# Altium footprint library KrakenFootprints.PcbLib: 8 footprints
Each footprint in its own frame and in the unit in brackets; x right, y up, seen from the top. Pads: shape width x height; smd on the part's side, far side on the other; paste and mask are expansions set on the pad; w line width, h text height; cw(c..) or ccw(c..) is an arc to the next point about the centre after c.
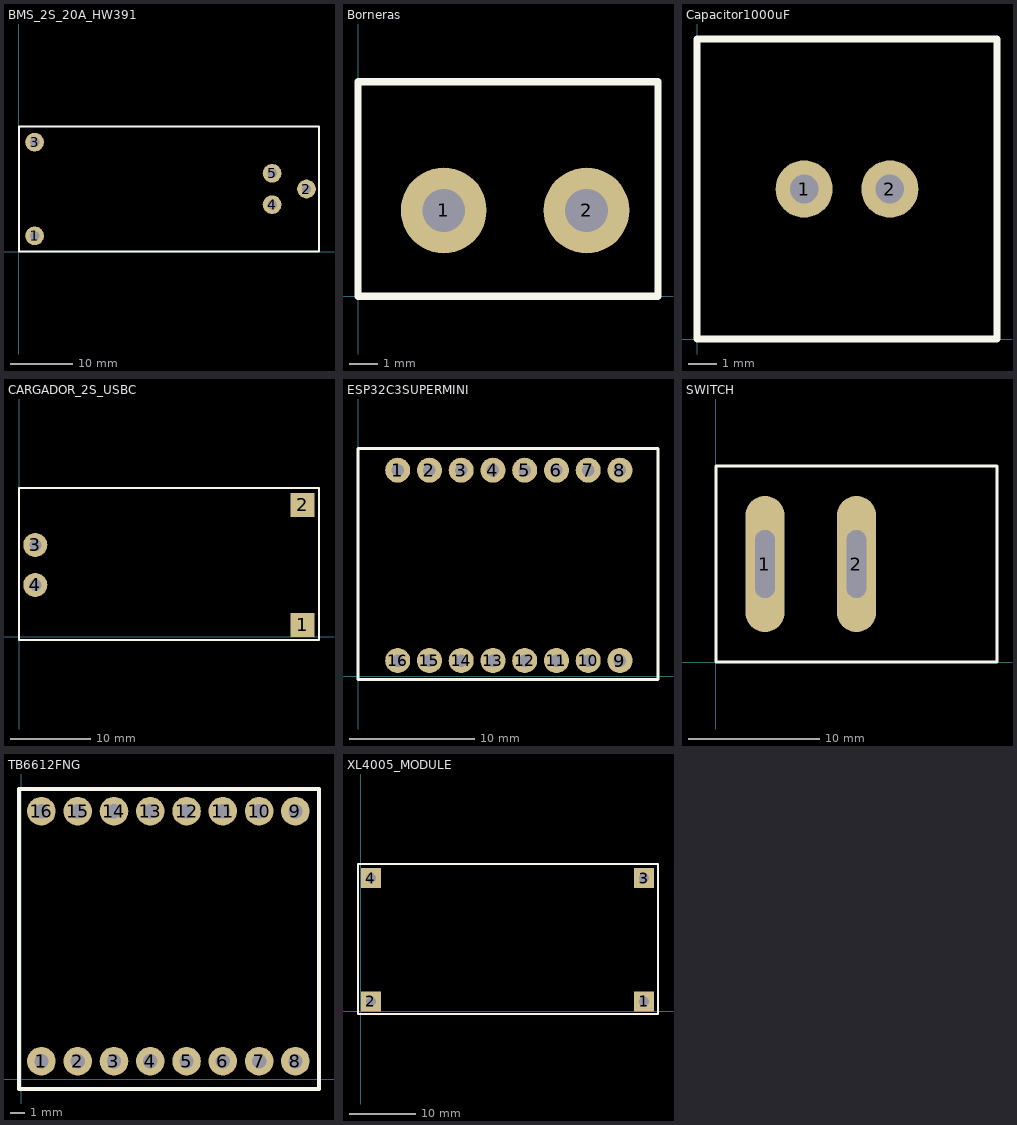
[diagram p0: the footprints below, top view; thin cyan lines are the x and y axes]

## BMS_2S_20A_HW391 [mm]
pads (5):
  round 3 hole 1.5: 1(2.5,2.5) 2(46,10) 3(2.5,17.5) 4(40.5,7.5) 5(40.5,12.5)
Top Overlay:
  lines w0.254: 0.006,0 48.006,0 48.006,20 0.006,20 0.006,0
3D body "HW-391 2S 20A BMS.step": height 2.3, standoff -1.01, extent 0,0.16 48,20.16

## Borneras [mm]
pads (2):
  round 3 hole 1.5: 1(3,3) 2(8,3)
Top Overlay:
  lines w0.254: 0,0 10.5,0 10.5,7.5 0,7.5 0,0
3D body "bornera2p.stp": height 10, standoff -3.7, extent 0.114,-0.04 10.414,7.66

## Capacitor1000uF [mm]
pads (2):
  round 2 hole 1: 1(3.75,5.25) 2(6.75,5.25)
Top Overlay:
  lines w0.254: 0,0 10.5,0 10.5,10.5 0,10.5 0,0
3D body "100uF electrolytic capacitor.step": height 17.01, standoff -22.25, extent 0.087,0.16 10.413,10.5

## CARGADOR_2S_USBC [mm]
pads (4):
  rect 3x3 smd: 1(35.433,1.524) 2(35.433,16.51)
  round 3 hole 1.5: 3(2,11.5) 4(2,6.5)
Top Overlay:
  lines w0.254: -0.035,-0.381 37.465,-0.381 37.465,18.619 -0.035,18.619 -0.035,-0.381
3D body "cargador2.step": height 3.31, standoff -1.2, extent 0.679,0.017 32.679,18.017

## ESP32C3SUPERMINI [mm]
pads (16):
  round 2 hole 1: 1(3.175,16.5) 2(5.715,16.5) 3(8.255,16.5) 4(10.795,16.5) 5(13.335,16.5) 6(15.875,16.5) 7(18.415,16.5) 8(20.955,16.5) 9(20.955,1.27) 10(18.415,1.27) 11(15.875,1.27) 12(13.335,1.27) 13(10.795,1.27) 14(8.255,1.27) 15(5.715,1.27) 16(3.175,1.27)
Top Overlay:
  lines w0.254: 0,-0.254 24,-0.254 24,18.246 0,18.246 0,-0.254
3D body "ESP32-C3-SuperMini.step": height 4.41, standoff -0.06, extent 0.142,-0.02 24.242,17.78

## SWITCH [mm]
pads (2):
  oval 3x10.4 hole 1.5 slot 5.2 at 90 deg: 1(3.75,7.5) 2(10.75,7.5)
Top Overlay:
  lines w0.254: 0,0 21.5,0 21.5,15 0,15 0,0
3D body "switch.step": height 17.5, standoff -6.5, extent -0.082,0.12 21.418,15.12

## TB6612FNG [mm]
pads (16):
  round 2 hole 1: 1(1.397,1.27) 2(3.937,1.27) 3(6.477,1.27) 4(9.017,1.27) 5(11.557,1.27) 6(14.097,1.27) 7(16.637,1.27) 8(19.177,1.27) 9(19.177,18.77) 10(16.637,18.77) 11(14.097,18.77) 12(11.557,18.77) 13(9.017,18.77) 14(6.477,18.77) 15(3.937,18.77) 16(1.397,18.77)
Top Overlay:
  lines w0.254: -0.172,-0.68 20.828,-0.68 20.828,20.32 -0.172,20.32 -0.172,-0.68
3D body "TB6612FNG_fusion.step": height 2, standoff -16.1, extent 0.087,-0.094 20.487,19.906

## XL4005_MODULE [mm]
pads (4):
  rect 3x3 hole 1.5: 1(42.5,1.5) 2(1.5,1.5) 3(42.5,20) 4(1.5,20)
Top Overlay:
  lines w0.254: -0.423,-0.381 44.577,-0.381 44.577,22.119 -0.423,22.119 -0.423,-0.381
3D body "XL4005_MODELO_3D_1.step": height 12.35, standoff -0.76, extent 0.127,0.202 44.127,21.844